# Altium footprint library ICs_VendorSpecific.PcbLib: 247 footprints (part 7 of 19)
Each footprint in its own frame and in the unit in brackets; x right, y up, seen from the top. Pads: shape width x height; smd on the part's side, far side on the other; paste and mask are expansions set on the pad; w line width, h text height; cw(c..) or ccw(c..) is an arc to the next point about the centre after c.
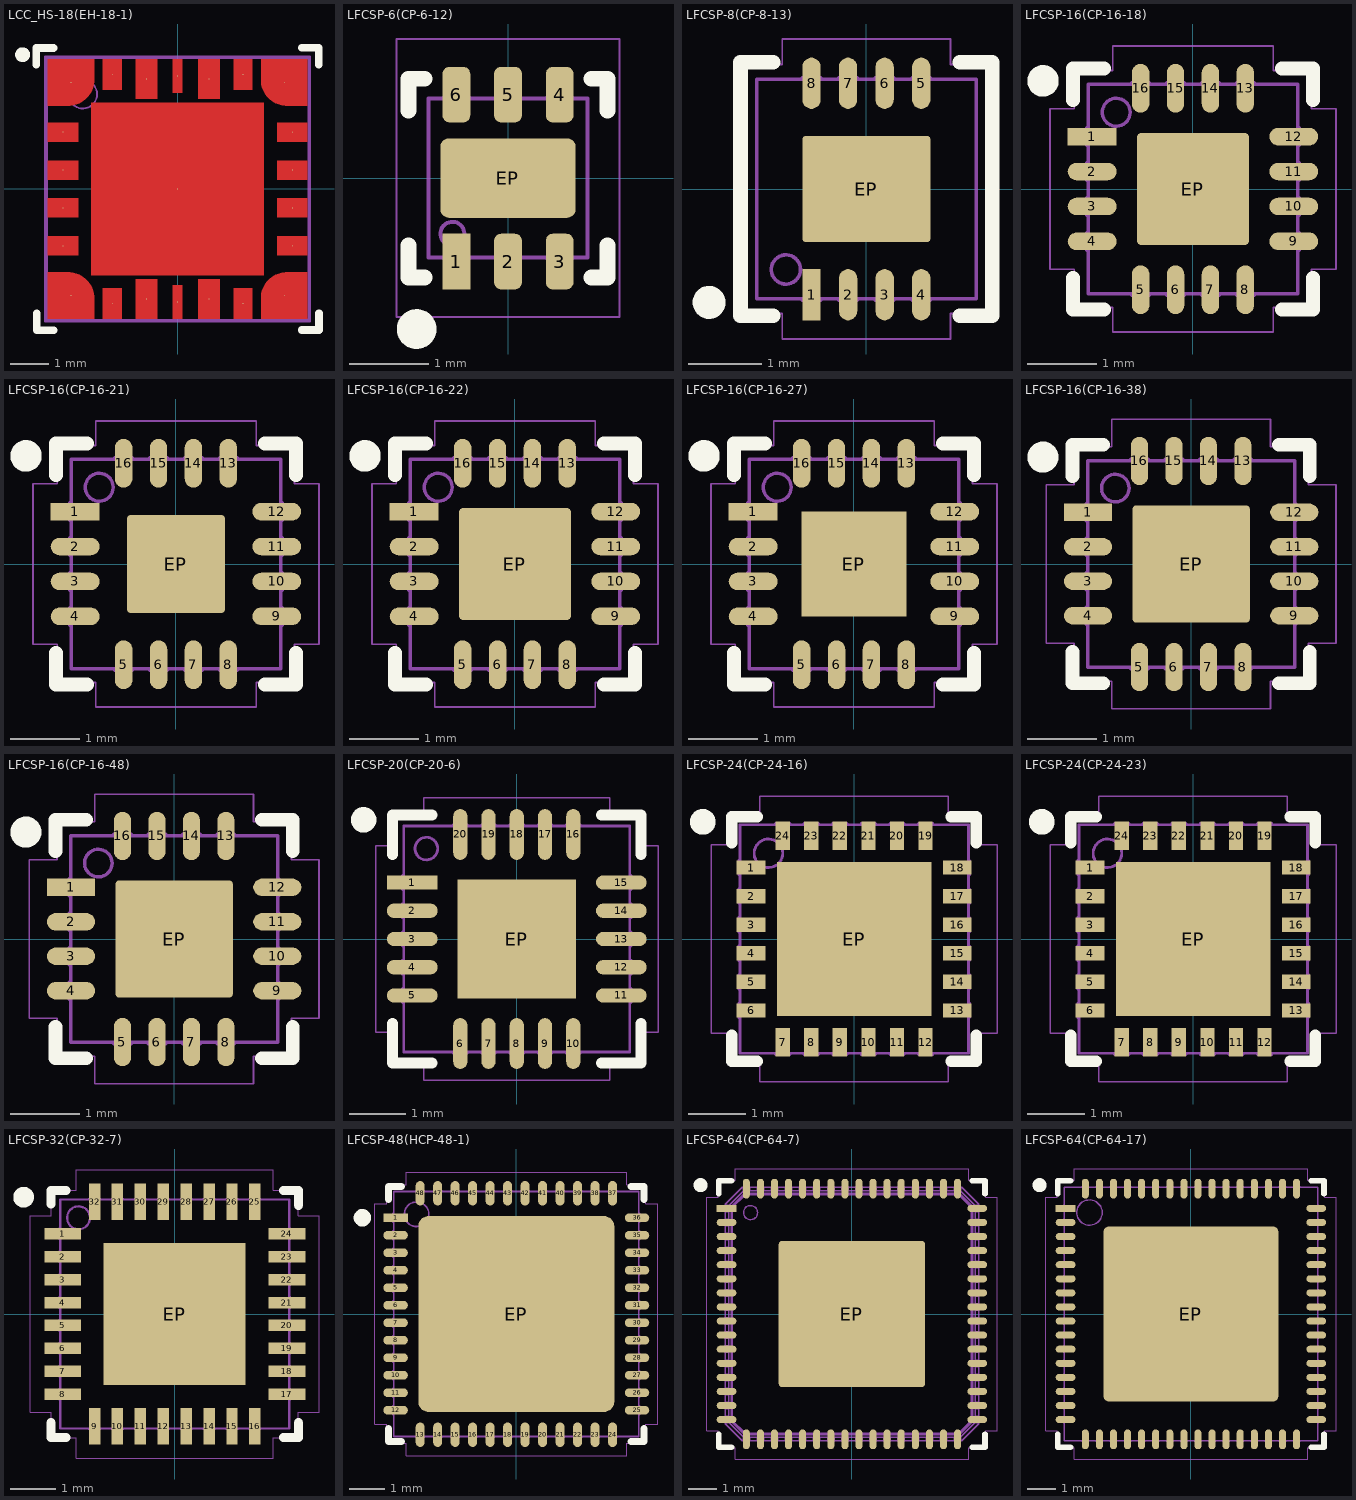
[diagram p6: the footprints below, top view; thin cyan lines are the x and y axes]

## LCC_HS-18(EH-18-1) [mil] "18-Terminal Ceramic Leadless Chip Carrier with Heat Sink  [LCC_HS], Thermal Pad 4.55x4.55mm"
height 51.85
pads (23):
  round 1 smd: 1(-119.09,59.06) 2(-119.09,19.69) 3(-119.09,-19.68) 4(-119.09,-59.06) 5(-67.91,-119.09) 6(-32.48,-114.17) 7(0,-117.32) 8(32.48,-114.17) 9(67.91,-119.09) 10(119.09,-59.06) 11(119.09,-19.68) 12(119.09,19.69) 13(119.09,59.06) 14(67.91,119.09) 15(32.48,114.17) 16(0,117.32) 17(-32.48,114.17) 18(-67.91,119.09) EP(-110.73,-110.73) EP(-110.73,110.73) EP(110.73,-110.73) EP(110.73,110.73)
  round 1 smd paste-196.85: EP(0,0)
Top Layer:
  region: -134.84,-86.61 -113.5,-86.61 -111.74,-86.61 -108.24,-87.07 -104.84,-87.99 -101.58,-89.33 -98.53,-91.1 -95.73,-93.24 -93.24,-95.73 -91.1,-98.53 -89.34,-101.58 -87.99,-104.84 -87.07,-108.24 -86.61,-111.73 -86.61,-113.5 -86.61,-134.84 -134.84,-134.84
  region: 134.84,86.61 113.5,86.61 111.74,86.61 108.24,87.07 104.84,87.99 101.58,89.33 98.53,91.1 95.73,93.24 93.24,95.73 91.1,98.53 89.34,101.58 87.99,104.84 87.07,108.24 86.61,111.74 86.61,113.5 86.61,134.84 134.84,134.84
  region: 86.61,-134.84 86.61,-113.5 86.61,-111.74 87.07,-108.24 87.99,-104.84 89.33,-101.58 91.1,-98.53 93.24,-95.73 95.73,-93.24 98.53,-91.1 101.58,-89.34 104.84,-87.99 108.24,-87.07 111.74,-86.61 113.5,-86.61 134.84,-86.61 134.84,-134.84
  region: -58.07,-134.84 -77.76,-134.84 -77.76,-103.35 -58.07,-103.35
  region: -21.26,-134.84 -43.7,-134.84 -43.7,-93.5 -21.26,-93.5
  region: 58.07,-134.84 77.76,-134.84 77.76,-103.35 58.07,-103.35
  region: 21.26,-134.84 43.7,-134.84 43.7,-93.5 21.26,-93.5
  region: -4.92,-134.84 4.92,-134.84 4.92,-99.8 -4.92,-99.8
  region: 58.07,134.84 77.76,134.84 77.76,103.35 58.07,103.35
  region: 21.26,134.84 43.7,134.84 43.7,93.5 21.26,93.5
  region: -58.07,134.84 -77.76,134.84 -77.76,103.35 -58.07,103.35
  region: -21.26,134.84 -43.7,134.84 -43.7,93.5 -21.26,93.5
  region: 134.84,-68.9 134.84,-49.21 103.35,-49.21 103.35,-68.9
  region: 134.84,-29.53 134.84,-9.84 103.35,-9.84 103.35,-29.53
  region: 134.84,9.84 134.84,29.53 103.35,29.53 103.35,9.84
  region: 134.84,49.21 134.84,68.9 103.35,68.9 103.35,49.21
  region: -134.84,-68.9 -134.84,-49.21 -103.35,-49.21 -103.35,-68.9
  region: -134.84,-29.53 -134.84,-9.84 -103.35,-9.84 -103.35,-29.53
  region: -134.84,9.84 -134.84,29.53 -103.35,29.53 -103.35,9.84
  region: -134.84,49.21 -134.84,68.9 -103.35,68.9 -103.35,49.21
  region: 4.92,134.84 -4.92,134.84 -4.92,99.8 4.92,99.8
  region: -86.61,134.84 -86.61,113.5 -86.61,111.74 -87.07,108.24 -87.99,104.84 -89.33,101.58 -91.1,98.53 -93.24,95.73 -95.73,93.24 -98.53,91.1 -101.58,89.34 -104.84,87.99 -108.24,87.07 -111.73,86.61 -113.5,86.61 -134.84,86.61 -134.84,134.84
  region: -89.57,-89.57 89.57,-89.57 89.57,89.57 -89.57,89.57
Top Overlay:
  circle w7.87: c-161.05,139.5 r3.74
  lines w7.87: -146.85,128.93 -146.85,146.46 -128.93,146.46 ; -146.46,-128.93 -146.46,-146.85 -128.93,-146.85 ; 128.93,-146.46 146.85,-146.46 146.85,-128.93 ; 128.93,146.85 146.46,146.85 146.46,128.93
Top Paste:
  rectangle: 4.92,50.2 40.35,85.63
  rectangle: -40.35,50.2 -4.92,85.63
  rectangle: -85.63,50.2 -50.2,85.63
  region: 85.63,85.63 50.2,85.63 50.2,50.2 85.63,50.2
  region: -85.63,-4.92 -85.63,-40.35 -50.2,-40.35 -50.2,-4.92
  region: -85.63,40.35 -85.63,4.92 -50.2,4.92 -50.2,40.35
  region: -50.2,-85.63 -50.2,-50.2 -85.63,-50.2 -85.63,-85.63
  region: -40.35,-4.92 -40.35,-40.35 -4.92,-40.35 -4.92,-4.92
  region: -40.35,40.35 -40.35,4.92 -4.92,4.92 -4.92,40.35
  region: -4.92,-85.63 -4.92,-50.2 -40.35,-50.2 -40.35,-85.63
  region: 4.92,-4.92 4.92,-40.35 40.35,-40.35 40.35,-4.92
  region: 4.92,40.35 4.92,4.92 40.35,4.92 40.35,40.35
  region: 40.35,-85.63 40.35,-50.2 4.92,-50.2 4.92,-85.63
  region: 50.2,-4.92 50.2,-40.35 85.63,-40.35 85.63,-4.92
  region: 50.2,40.35 50.2,4.92 85.63,4.92 85.63,40.35
  region: 85.63,-85.63 85.63,-50.2 50.2,-50.2 50.2,-85.63
Top Assembly:
  circle w1.97: c-98.43,98.43 r14.76
  lines w1.97: -135.83,-133.86 ccw(c-133.86,-133.86) -133.86,-135.83 ; -135.83,133.86 cw(c-133.86,133.86) -133.86,135.83 ; 133.86,-135.83 ccw(c133.86,-133.86) 135.83,-133.86 ; 133.86,135.83 cw(c133.86,133.86) 135.83,133.86 ; -137.8,-137.8 -137.8,137.8 ; -137.8,-137.8 -135.83,-135.83 ; -137.8,-137.8 137.8,-137.8 ; -137.8,137.8 -135.83,135.83 ; -137.8,137.8 137.8,137.8 ; -135.83,-135.83 -135.83,135.83 ; -135.83,-135.83 135.83,-135.83 ; -135.83,135.83 135.83,135.83 ; 135.83,-135.83 135.83,135.83 ; 135.83,-135.83 137.8,-137.8 ; 135.83,135.83 137.8,137.8 ; 137.8,-137.8 137.8,137.8
  text ".Designator" at -133.01,-13.35 h59.06
3D body "LCC_HS(EH-18-1).x_t": height 52.64, standoff 0, extent -137.8,-137.8 137.8,137.8

## LFCSP-6(CP-6-12) [mm] "QFN, 6-Leads, Body 2x2mm, Pitch 0.650mm, Thermal Pad 1.0x1.6mm"
height 0.85
pads (7):
  rect 0.35x0.7 smd mask+0.05: 1(-0.65,-1.05)
  rrect50% 0.35x0.7 smd mask+0.05: 2(0,-1.05) 3(0.65,-1.05) 4(0.65,1.05) 5(0,1.05) 6(-0.65,1.05)
  rrect20% 1.7x1 smd mask+0.05: EP(0,0)
Top Overlay:
  circle w0.25: c-1.15,-1.9 r0.125
  lines w0.2: -1.25,-0.85 -1.25,-1.25 -1.05,-1.25 ; -1.25,0.85 -1.25,1.25 -1.05,1.25 ; 1.05,-1.25 1.25,-1.25 1.25,-0.85 ; 1.05,1.25 1.25,1.25 1.25,0.85
Top Courtyard:
  lines w0.025: -1.4,-1.75 -1.4,1.75 1.4,1.75 1.4,-1.75 -1.4,-1.75
Top Assembly:
  circle w0.05: c-0.7,-0.7 r0.15
  lines w0.05: -0.8,-1 -0.8,-1.02 -0.5,-1.02 -0.5,-1 ; -0.8,1 -0.8,1.02 -0.5,1.02 -0.5,1 ; -0.15,-1 -0.15,-1.02 0.15,-1.02 0.15,-1 ; -0.15,1 -0.15,1.02 0.15,1.02 0.15,1 ; 0.5,-1 0.5,-1.02 0.8,-1.02 0.8,-1 ; 0.5,1 0.5,1.02 0.8,1.02 0.8,1 ; -1,-1 -1,1 1,1 1,-1 -1,-1
  text ".Designator" at -2.252,-0.226 h1
3D body "LFCSP6(CP-6-12).x_t": height 0.87, standoff 0, extent -1,-1.02 1,1.02

## LFCSP-8(CP-8-13) [mm] "QFN, 8-Leads, Body 3x3mm, Pitch 0.50mm, Thermal Pad 1.45x1.74mm. Compliant to JEDEC standards MO-229-WEED-4"
height 0.75
pads (9):
  rect 0.25x0.7 smd mask+0.05: 1(-0.75,-1.445)
  oval 0.25x0.7 smd mask+0.05: 2(-0.25,-1.445) 3(0.25,-1.445) 4(0.75,-1.445) 5(0.75,1.445) 6(0.25,1.445) 7(-0.25,1.445) 8(-0.75,1.445)
  rrect6% 1.75x1.45 smd paste-5 mask+0.05: EP(0,0)
Top Overlay:
  circle w0.25: c-2.15,-1.55 r0.1
  lines w0.2: -1.275,-1.73 -1.72,-1.73 -1.72,1.73 -1.275,1.73 ; 1.275,-1.73 1.72,-1.73 1.72,1.73 1.275,1.73
Top Paste:
  rectangle: -0.85,0.1 -0.1,0.7
  rectangle: -0.85,-0.7 -0.1,-0.1
  region: 0.85,-0.1 0.1,-0.1 0.1,-0.7 0.85,-0.7
  region: 0.85,0.7 0.1,0.7 0.1,0.1 0.85,0.1
Top Courtyard:
  lines w0.025: -1.7,-1.7 -1.7,-1.15 -1.7,1.15 -1.7,1.7 -1.15,1.7 -1.15,2.05 1.15,2.05 1.15,1.7 1.7,1.7 1.7,1.15 1.7,-1.15 1.7,-1.7 1.15,-1.7 1.15,-2.05 -1.15,-2.05 -1.15,-1.7 -1.7,-1.7
Top Assembly:
  circle w0.05: c-1.1,-1.1 r0.2
  lines w0.05: -0.875,-1.5 -0.875,-1.52 -0.625,-1.52 -0.625,-1.5 ; -0.875,1.5 -0.875,1.52 -0.625,1.52 -0.625,1.5 ; -0.375,-1.5 -0.375,-1.52 -0.125,-1.52 -0.125,-1.5 ; -0.375,1.5 -0.375,1.52 -0.125,1.52 -0.125,1.5 ; 0.125,-1.5 0.125,-1.52 0.375,-1.52 0.375,-1.5 ; 0.125,1.5 0.125,1.52 0.375,1.52 0.375,1.5 ; 0.625,-1.5 0.625,-1.52 0.875,-1.52 0.875,-1.5 ; 0.625,1.5 0.625,1.52 0.875,1.52 0.875,1.5 ; -1.5,-1.5 -1.5,1.5 1.5,1.5 1.5,-1.5 -1.5,-1.5
  text ".Designator" at -4.511,-0.453 h2
3D body "LFCSP8(CP-8-13).x_t": height 0.8, standoff 0, extent -1.5,-1.525 1.5,1.525

## LFCSP-16(CP-16-18) [mm] "QFN, 16-Leads, Body 3x3mm, Pitch 0.50mm, Thermal Pad 1.50x1.50mm. Compliant to JEDEC standards MO-220-WEED-6"
height 0.75
pads (17):
  rect 0.7x0.25 smd mask+0.05: 1(-1.445,0.75)
  oval 0.7x0.25 smd mask+0.05: 2(-1.445,0.25) 3(-1.445,-0.25) 4(-1.445,-0.75) 9(1.445,-0.75) 10(1.445,-0.25) 11(1.445,0.25) 12(1.445,0.75)
  oval 0.25x0.7 smd mask+0.05: 5(-0.75,-1.445) 6(-0.25,-1.445) 7(0.25,-1.445) 8(0.75,-1.445) 13(0.75,1.445) 14(0.25,1.445) 15(-0.25,1.445) 16(-0.75,1.445)
  rrect6% 1.6x1.6 smd paste-5 mask+0.05: EP(0,0)
Top Overlay:
  circle w0.25: c-2.15,1.55 r0.1
  lines w0.2: -1.72,-1.275 -1.72,-1.73 -1.275,-1.73 ; -1.72,1.275 -1.72,1.73 -1.275,1.73 ; 1.275,-1.73 1.72,-1.73 1.72,-1.275 ; 1.275,1.73 1.72,1.73 1.72,1.275
Top Paste:
  rectangle: -0.7,0.1 -0.1,0.7
  rectangle: -0.7,-0.7 -0.1,-0.1
  region: 0.7,-0.1 0.1,-0.1 0.1,-0.7 0.7,-0.7
  region: 0.7,0.7 0.1,0.7 0.1,0.1 0.7,0.1
Top Courtyard:
  lines w0.025: -2.05,-1.15 -1.7,-1.15 -1.7,-1.7 -1.15,-1.7 -1.15,-2.05 1.15,-2.05 1.15,-1.7 1.7,-1.7 1.7,-1.15 2.05,-1.15 2.05,1.15 1.7,1.15 1.7,1.7 1.15,1.7 1.15,2.05 -1.15,2.05 -1.15,1.7 -1.7,1.7 -1.7,1.15 -2.05,1.15 -2.05,-1.15
Top Assembly:
  circle w0.05: c-1.1,1.1 r0.2
  lines w0.05: -1.5,-0.875 -1.52,-0.875 -1.52,-0.625 -1.5,-0.625 ; -1.5,-0.375 -1.52,-0.375 -1.52,-0.125 -1.5,-0.125 ; -1.5,0.125 -1.52,0.125 -1.52,0.375 -1.5,0.375 ; -1.5,0.625 -1.52,0.625 -1.52,0.875 -1.5,0.875 ; -0.875,-1.5 -0.875,-1.52 -0.625,-1.52 -0.625,-1.5 ; -0.875,1.5 -0.875,1.52 -0.625,1.52 -0.625,1.5 ; -0.375,-1.5 -0.375,-1.52 -0.125,-1.52 -0.125,-1.5 ; -0.375,1.5 -0.375,1.52 -0.125,1.52 -0.125,1.5 ; 0.125,-1.5 0.125,-1.52 0.375,-1.52 0.375,-1.5 ; 0.125,1.5 0.125,1.52 0.375,1.52 0.375,1.5 ; 0.625,-1.5 0.625,-1.52 0.875,-1.52 0.875,-1.5 ; 0.625,1.5 0.625,1.52 0.875,1.52 0.875,1.5 ; 1.5,-0.875 1.52,-0.875 1.52,-0.625 1.5,-0.625 ; 1.5,-0.375 1.52,-0.375 1.52,-0.125 1.5,-0.125 ; 1.5,0.125 1.52,0.125 1.52,0.375 1.5,0.375 ; 1.5,0.625 1.52,0.625 1.52,0.875 1.5,0.875 ; -1.5,-1.5 -1.5,1.5 1.5,1.5 1.5,-1.5 -1.5,-1.5
  text ".Designator" at -4.511,-0.453 h2
3D body "LFCSP16(CP-16-18).x_t": height 0.8, standoff 0, extent -1.525,-1.525 1.525,1.525

## LFCSP-16(CP-16-21) [mm] "QFN, 16-Leads, Body 3x3mm, Pitch 0.50mm, Thermal Pad 1.30x1.30mm. Compliant to JEDEC standards MO-220-WEED-6"
height 0.75
pads (17):
  rect 0.7x0.25 smd mask+0.05: 1(-1.445,0.75)
  oval 0.7x0.25 smd mask+0.05: 2(-1.445,0.25) 3(-1.445,-0.25) 4(-1.445,-0.75) 9(1.445,-0.75) 10(1.445,-0.25) 11(1.445,0.25) 12(1.445,0.75)
  oval 0.25x0.7 smd mask+0.05: 5(-0.75,-1.445) 6(-0.25,-1.445) 7(0.25,-1.445) 8(0.75,-1.445) 13(0.75,1.445) 14(0.25,1.445) 15(-0.25,1.445) 16(-0.75,1.445)
  rrect6% 1.4x1.4 smd paste-5 mask+0.05: EP(0,0)
Top Overlay:
  circle w0.25: c-2.15,1.55 r0.1
  lines w0.2: -1.72,-1.275 -1.72,-1.73 -1.275,-1.73 ; -1.72,1.275 -1.72,1.73 -1.275,1.73 ; 1.275,-1.73 1.72,-1.73 1.72,-1.275 ; 1.275,1.73 1.72,1.73 1.72,1.275
Top Paste:
  region: 0.7,0.7 0.1,0.7 0.1,0.1 0.7,0.1
  region: 0.7,-0.1 0.1,-0.1 0.1,-0.7 0.7,-0.7
  rectangle: -0.7,-0.7 -0.1,-0.1
  rectangle: -0.7,0.1 -0.1,0.7
Top Courtyard:
  lines w0.025: -2.05,-1.15 -2.05,1.15 -1.7,1.15 -1.7,1.7 -1.15,1.7 -1.15,2.05 1.15,2.05 1.15,1.7 1.7,1.7 1.7,1.15 2.05,1.15 2.05,-1.15 1.7,-1.15 1.7,-1.7 1.15,-1.7 1.15,-2.05 -1.15,-2.05 -1.15,-1.7 -1.7,-1.7 -1.7,-1.15 -2.05,-1.15
Top Assembly:
  circle w0.05: c-1.1,1.1 r0.2
  lines w0.05: -1.5,-0.875 -1.52,-0.875 -1.52,-0.625 -1.5,-0.625 ; -1.5,-0.375 -1.52,-0.375 -1.52,-0.125 -1.5,-0.125 ; -1.5,0.125 -1.52,0.125 -1.52,0.375 -1.5,0.375 ; -1.5,0.625 -1.52,0.625 -1.52,0.875 -1.5,0.875 ; -0.875,-1.5 -0.875,-1.52 -0.625,-1.52 -0.625,-1.5 ; -0.875,1.5 -0.875,1.52 -0.625,1.52 -0.625,1.5 ; -0.375,-1.5 -0.375,-1.52 -0.125,-1.52 -0.125,-1.5 ; -0.375,1.5 -0.375,1.52 -0.125,1.52 -0.125,1.5 ; 0.125,-1.5 0.125,-1.52 0.375,-1.52 0.375,-1.5 ; 0.125,1.5 0.125,1.52 0.375,1.52 0.375,1.5 ; 0.625,-1.5 0.625,-1.52 0.875,-1.52 0.875,-1.5 ; 0.625,1.5 0.625,1.52 0.875,1.52 0.875,1.5 ; 1.5,-0.875 1.52,-0.875 1.52,-0.625 1.5,-0.625 ; 1.5,-0.375 1.52,-0.375 1.52,-0.125 1.5,-0.125 ; 1.5,0.125 1.52,0.125 1.52,0.375 1.5,0.375 ; 1.5,0.625 1.52,0.625 1.52,0.875 1.5,0.875 ; -1.5,-1.5 1.5,-1.5 1.5,1.5 -1.5,1.5 -1.5,-1.5
  text ".Designator" at -4.511,-0.453 h2
3D body "LFCSP16(CP-16-21)_X_T.x_t": height 0.8, standoff 0, extent -1.525,-1.525 1.525,1.525

## LFCSP-16(CP-16-22) [mm] "QFN, 16-Leads, Body 3x3mm, Pitch 0.50mm, Thermal Pad 1.50x1.50mm. Compliant to JEDEC standards MO-220-WEED-6"
height 0.75
pads (17):
  rect 0.7x0.25 smd mask+0.05: 1(-1.445,0.75)
  oval 0.7x0.25 smd mask+0.05: 2(-1.445,0.25) 3(-1.445,-0.25) 4(-1.445,-0.75) 9(1.445,-0.75) 10(1.445,-0.25) 11(1.445,0.25) 12(1.445,0.75)
  oval 0.25x0.7 smd mask+0.05: 5(-0.75,-1.445) 6(-0.25,-1.445) 7(0.25,-1.445) 8(0.75,-1.445) 13(0.75,1.445) 14(0.25,1.445) 15(-0.25,1.445) 16(-0.75,1.445)
  rrect6% 1.6x1.6 smd paste-5 mask+0.05: EP(0,0)
Top Overlay:
  circle w0.25: c-2.15,1.55 r0.1
  lines w0.2: -1.72,-1.275 -1.72,-1.73 -1.275,-1.73 ; -1.72,1.275 -1.72,1.73 -1.275,1.73 ; 1.275,-1.73 1.72,-1.73 1.72,-1.275 ; 1.275,1.73 1.72,1.73 1.72,1.275
Top Paste:
  region: 0.7,0.7 0.1,0.7 0.1,0.1 0.7,0.1
  region: 0.7,-0.1 0.1,-0.1 0.1,-0.7 0.7,-0.7
  rectangle: -0.7,-0.7 -0.1,-0.1
  rectangle: -0.7,0.1 -0.1,0.7
Top Courtyard:
  lines w0.025: -2.05,-1.15 -2.05,1.15 -1.7,1.15 -1.7,1.7 -1.15,1.7 -1.15,2.05 1.15,2.05 1.15,1.7 1.7,1.7 1.7,1.15 2.05,1.15 2.05,-1.15 1.7,-1.15 1.7,-1.7 1.15,-1.7 1.15,-2.05 -1.15,-2.05 -1.15,-1.7 -1.7,-1.7 -1.7,-1.15 -2.05,-1.15
Top Assembly:
  circle w0.05: c-1.1,1.1 r0.2
  lines w0.05: -1.5,-0.875 -1.52,-0.875 -1.52,-0.625 -1.5,-0.625 ; -1.5,-0.375 -1.52,-0.375 -1.52,-0.125 -1.5,-0.125 ; -1.5,0.125 -1.52,0.125 -1.52,0.375 -1.5,0.375 ; -1.5,0.625 -1.52,0.625 -1.52,0.875 -1.5,0.875 ; -0.875,-1.5 -0.875,-1.52 -0.625,-1.52 -0.625,-1.5 ; -0.875,1.5 -0.875,1.52 -0.625,1.52 -0.625,1.5 ; -0.375,-1.5 -0.375,-1.52 -0.125,-1.52 -0.125,-1.5 ; -0.375,1.5 -0.375,1.52 -0.125,1.52 -0.125,1.5 ; 0.125,-1.5 0.125,-1.52 0.375,-1.52 0.375,-1.5 ; 0.125,1.5 0.125,1.52 0.375,1.52 0.375,1.5 ; 0.625,-1.5 0.625,-1.52 0.875,-1.52 0.875,-1.5 ; 0.625,1.5 0.625,1.52 0.875,1.52 0.875,1.5 ; 1.5,-0.875 1.52,-0.875 1.52,-0.625 1.5,-0.625 ; 1.5,-0.375 1.52,-0.375 1.52,-0.125 1.5,-0.125 ; 1.5,0.125 1.52,0.125 1.52,0.375 1.5,0.375 ; 1.5,0.625 1.52,0.625 1.52,0.875 1.5,0.875 ; -1.5,-1.5 1.5,-1.5 1.5,1.5 -1.5,1.5 -1.5,-1.5
  text ".Designator" at -4.511,-0.453 h2
3D body "LFCSP16(CP-16-22).x_t": height 0.8, standoff 0, extent -1.525,-1.525 1.525,1.525

## LFCSP-16(CP-16-27) [mm] "QFN, 16-Leads, Body 3x3mm, Pitch 0.50mm, Thermal Pad 1.50x1.50mm. Compliant to JEDEC standards MO-220-WEED-6"
height 0.85
pads (17):
  rect 0.7x0.25 smd mask+0.05: 1(-1.445,0.75)
  oval 0.7x0.25 smd mask+0.05: 2(-1.445,0.25) 3(-1.445,-0.25) 4(-1.445,-0.75) 9(1.445,-0.75) 10(1.445,-0.25) 11(1.445,0.25) 12(1.445,0.75)
  oval 0.25x0.7 smd mask+0.05: 5(-0.75,-1.445) 6(-0.25,-1.445) 7(0.25,-1.445) 8(0.75,-1.445) 13(0.75,1.445) 14(0.25,1.445) 15(-0.25,1.445) 16(-0.75,1.445)
  rect 1.5x1.5 smd paste-5 mask+0.07: EP(0,0)
Top Overlay:
  circle w0.25: c-2.15,1.55 r0.1
  lines w0.2: -1.72,-1.275 -1.72,-1.73 -1.275,-1.73 ; -1.72,1.275 -1.72,1.73 -1.275,1.73 ; 1.275,-1.73 1.72,-1.73 1.72,-1.275 ; 1.275,1.73 1.72,1.73 1.72,1.275
Top Paste:
  region: 0.7,0.7 0.1,0.7 0.1,0.1 0.7,0.1
  region: 0.7,-0.1 0.1,-0.1 0.1,-0.7 0.7,-0.7
  rectangle: -0.7,-0.7 -0.1,-0.1
  rectangle: -0.7,0.1 -0.1,0.7
Top Courtyard:
  lines w0.025: -2.05,-1.15 -2.05,1.15 -1.7,1.15 -1.7,1.7 -1.15,1.7 -1.15,2.05 1.15,2.05 1.15,1.7 1.7,1.7 1.7,1.15 2.05,1.15 2.05,-1.15 1.7,-1.15 1.7,-1.7 1.15,-1.7 1.15,-2.05 -1.15,-2.05 -1.15,-1.7 -1.7,-1.7 -1.7,-1.15 -2.05,-1.15
Top Assembly:
  circle w0.05: c-1.1,1.1 r0.2
  lines w0.05: -1.5,-0.875 -1.52,-0.875 -1.52,-0.625 -1.5,-0.625 ; -1.5,-0.375 -1.52,-0.375 -1.52,-0.125 -1.5,-0.125 ; -1.5,0.125 -1.52,0.125 -1.52,0.375 -1.5,0.375 ; -1.5,0.625 -1.52,0.625 -1.52,0.875 -1.5,0.875 ; -0.875,-1.5 -0.875,-1.52 -0.625,-1.52 -0.625,-1.5 ; -0.875,1.5 -0.875,1.52 -0.625,1.52 -0.625,1.5 ; -0.375,-1.5 -0.375,-1.52 -0.125,-1.52 -0.125,-1.5 ; -0.375,1.5 -0.375,1.52 -0.125,1.52 -0.125,1.5 ; 0.125,-1.5 0.125,-1.52 0.375,-1.52 0.375,-1.5 ; 0.125,1.5 0.125,1.52 0.375,1.52 0.375,1.5 ; 0.625,-1.5 0.625,-1.52 0.875,-1.52 0.875,-1.5 ; 0.625,1.5 0.625,1.52 0.875,1.52 0.875,1.5 ; 1.5,-0.875 1.52,-0.875 1.52,-0.625 1.5,-0.625 ; 1.5,-0.375 1.52,-0.375 1.52,-0.125 1.5,-0.125 ; 1.5,0.125 1.52,0.125 1.52,0.375 1.5,0.375 ; 1.5,0.625 1.52,0.625 1.52,0.875 1.5,0.875 ; -1.5,-1.5 1.5,-1.5 1.5,1.5 -1.5,1.5 -1.5,-1.5
  text ".Designator" at -4.511,-0.453 h2
3D body "CP-16-27(LFCSP16).x_t": height 0.78, standoff 0, extent -1.52,-1.52 1.52,1.52

## LFCSP-16(CP-16-38) [mm] "QFN, 16-Leads, Body 3x3mm, Pitch 0.50mm, Thermal Pad 1.70x1.70mm. Compliant to JEDEC standards MO-220-VEED-4"
height 0.85
pads (17):
  rect 0.7x0.25 smd mask+0.05: 1(-1.495,0.75)
  oval 0.7x0.25 smd mask+0.05: 2(-1.495,0.25) 3(-1.495,-0.25) 4(-1.495,-0.75) 9(1.495,-0.75) 10(1.495,-0.25) 11(1.495,0.25) 12(1.495,0.75)
  oval 0.25x0.7 smd mask+0.05: 5(-0.75,-1.495) 6(-0.25,-1.495) 7(0.25,-1.495) 8(0.75,-1.495) 13(0.75,1.495) 14(0.25,1.495) 15(-0.25,1.495) 16(-0.75,1.495)
  rrect6% 1.7x1.7 smd paste-5 mask+0.05: EP(0,0)
Top Overlay:
  circle w0.25: c-2.15,1.55 r0.1
  lines w0.2: -1.72,-1.275 -1.72,-1.73 -1.275,-1.73 ; -1.72,1.275 -1.72,1.73 -1.275,1.73 ; 1.275,-1.73 1.72,-1.73 1.72,-1.275 ; 1.275,1.73 1.72,1.73 1.72,1.275
Top Paste:
  region: 0.7,0.7 0.1,0.7 0.1,0.1 0.7,0.1
  region: 0.7,-0.1 0.1,-0.1 0.1,-0.7 0.7,-0.7
  rectangle: -0.7,-0.7 -0.1,-0.1
  rectangle: -0.7,0.1 -0.1,0.7
Top Courtyard:
  lines w0.025: -2.1,-1.15 -2.1,1.15 -1.7,1.15 -1.7,1.7 -1.15,1.7 -1.15,2.1 1.15,2.1 1.15,1.7 1.7,1.7 1.7,1.15 2.1,1.15 2.1,-1.15 1.7,-1.15 1.7,-1.7 1.15,-1.7 1.15,-2.1 -1.15,-2.1 -1.15,-1.7 -1.7,-1.7 -1.7,-1.15 -2.1,-1.15
Top Assembly:
  circle w0.05: c-1.1,1.1 r0.2
  lines w0.05: -1.5,-0.875 -1.52,-0.875 -1.52,-0.625 -1.5,-0.625 ; -1.5,-0.375 -1.52,-0.375 -1.52,-0.125 -1.5,-0.125 ; -1.5,0.125 -1.52,0.125 -1.52,0.375 -1.5,0.375 ; -1.5,0.625 -1.52,0.625 -1.52,0.875 -1.5,0.875 ; -0.875,-1.5 -0.875,-1.52 -0.625,-1.52 -0.625,-1.5 ; -0.875,1.5 -0.875,1.52 -0.625,1.52 -0.625,1.5 ; -0.375,-1.5 -0.375,-1.52 -0.125,-1.52 -0.125,-1.5 ; -0.375,1.5 -0.375,1.52 -0.125,1.52 -0.125,1.5 ; 0.125,-1.5 0.125,-1.52 0.375,-1.52 0.375,-1.5 ; 0.125,1.5 0.125,1.52 0.375,1.52 0.375,1.5 ; 0.625,-1.5 0.625,-1.52 0.875,-1.52 0.875,-1.5 ; 0.625,1.5 0.625,1.52 0.875,1.52 0.875,1.5 ; 1.5,-0.875 1.52,-0.875 1.52,-0.625 1.5,-0.625 ; 1.5,-0.375 1.52,-0.375 1.52,-0.125 1.5,-0.125 ; 1.5,0.125 1.52,0.125 1.52,0.375 1.5,0.375 ; 1.5,0.625 1.52,0.625 1.52,0.875 1.5,0.875 ; -1.5,-1.5 1.5,-1.5 1.5,1.5 -1.5,1.5 -1.5,-1.5
  text ".Designator" at -4.511,-0.453 h2
3D body "CP-16-38(LFCSP16).x_t": height 0.88, standoff 0, extent -1.52,-1.52 1.52,1.52

## LFCSP-16(CP-16-48) [mm] "QFN, 16-Leads, Body 3x3mm, Pitch 0.50mm, Thermal Pad 1.70x1.70mm. Compliant to JEDEC standards MO-220-WEED-4"
height 0.75
pads (17):
  rect 0.7x0.25 smd mask+0.05: 1(-1.495,0.75)
  oval 0.7x0.25 smd mask+0.05: 2(-1.495,0.25) 3(-1.495,-0.25) 4(-1.495,-0.75) 9(1.495,-0.75) 10(1.495,-0.25) 11(1.495,0.25) 12(1.495,0.75)
  oval 0.25x0.7 smd mask+0.05: 5(-0.75,-1.495) 6(-0.25,-1.495) 7(0.25,-1.495) 8(0.75,-1.495) 13(0.75,1.495) 14(0.25,1.495) 15(-0.25,1.495) 16(-0.75,1.495)
  rrect6% 1.7x1.7 smd paste-5 mask+0.05: EP(0,0)
Top Overlay:
  circle w0.25: c-2.15,1.55 r0.1
  lines w0.2: -1.72,-1.275 -1.72,-1.73 -1.275,-1.73 ; -1.72,1.275 -1.72,1.73 -1.275,1.73 ; 1.275,-1.73 1.72,-1.73 1.72,-1.275 ; 1.275,1.73 1.72,1.73 1.72,1.275
Top Paste:
  rectangle: -0.7,0.1 -0.1,0.7
  rectangle: -0.7,-0.7 -0.1,-0.1
  region: 0.7,-0.1 0.1,-0.1 0.1,-0.7 0.7,-0.7
  region: 0.7,0.7 0.1,0.7 0.1,0.1 0.7,0.1
Top Courtyard:
  lines w0.025: -2.1,-1.15 -1.7,-1.15 -1.7,-1.7 -1.15,-1.7 -1.15,-2.1 1.15,-2.1 1.15,-1.7 1.7,-1.7 1.7,-1.15 2.1,-1.15 2.1,1.15 1.7,1.15 1.7,1.7 1.15,1.7 1.15,2.1 -1.15,2.1 -1.15,1.7 -1.7,1.7 -1.7,1.15 -2.1,1.15 -2.1,-1.15
Top Assembly:
  circle w0.05: c-1.1,1.1 r0.2
  lines w0.05: -1.5,-0.875 -1.52,-0.875 -1.52,-0.625 -1.5,-0.625 ; -1.5,-0.375 -1.52,-0.375 -1.52,-0.125 -1.5,-0.125 ; -1.5,0.125 -1.52,0.125 -1.52,0.375 -1.5,0.375 ; -1.5,0.625 -1.52,0.625 -1.52,0.875 -1.5,0.875 ; -0.875,-1.5 -0.875,-1.52 -0.625,-1.52 -0.625,-1.5 ; -0.875,1.5 -0.875,1.52 -0.625,1.52 -0.625,1.5 ; -0.375,-1.5 -0.375,-1.52 -0.125,-1.52 -0.125,-1.5 ; -0.375,1.5 -0.375,1.52 -0.125,1.52 -0.125,1.5 ; 0.125,-1.5 0.125,-1.52 0.375,-1.52 0.375,-1.5 ; 0.125,1.5 0.125,1.52 0.375,1.52 0.375,1.5 ; 0.625,-1.5 0.625,-1.52 0.875,-1.52 0.875,-1.5 ; 0.625,1.5 0.625,1.52 0.875,1.52 0.875,1.5 ; 1.5,-0.875 1.52,-0.875 1.52,-0.625 1.5,-0.625 ; 1.5,-0.375 1.52,-0.375 1.52,-0.125 1.5,-0.125 ; 1.5,0.125 1.52,0.125 1.52,0.375 1.5,0.375 ; 1.5,0.625 1.52,0.625 1.52,0.875 1.5,0.875 ; -1.5,-1.5 -1.5,1.5 1.5,1.5 1.5,-1.5 -1.5,-1.5
  text ".Designator" at -4.511,-0.453 h2
3D body "LFCSP16(CP-16-48).x_t": height 0.8, standoff 0, extent -1.525,-1.525 1.525,1.525

## LFCSP-20(CP-20-6) [mm] "QFN, 20-Leads, Body 4x4mm, Pitch 0.50mm, Thermal Pad 2.10x2.10mm. Compliant to JEDEC standards MO-220-WGGD-1"
height 0.75
pads (21):
  rect 0.9x0.25 smd mask+0.05: 1(-1.85,1)
  oval 0.9x0.25 smd mask+0.05: 2(-1.85,0.5) 3(-1.85,0) 4(-1.85,-0.5) 5(-1.85,-1) 11(1.85,-1) 12(1.85,-0.5) 13(1.85,0) 14(1.85,0.5) 15(1.85,1)
  oval 0.25x0.9 smd mask+0.05: 6(-1,-1.85) 7(-0.5,-1.85) 8(0,-1.85) 9(0.5,-1.85) 10(1,-1.85) 16(1,1.85) 17(0.5,1.85) 18(0,1.85) 19(-0.5,1.85) 20(-1,1.85)
  rect 2.1x2.1 smd paste-5 mask+0.05: EP(0,0)
Top Overlay:
  circle w0.25: c-2.71,2.109 r0.1
  lines w0.2: -2.2,-1.495 -2.2,-2.195 -1.5,-2.195 ; -2.2,1.495 -2.2,2.195 -1.5,2.195 ; 1.5,-2.195 2.2,-2.195 2.2,-1.495 ; 1.5,2.195 2.2,2.195 2.2,1.495
Top Paste:
  rectangle: -0.95,0.15 -0.15,0.95
  rectangle: 0.15,0.15 0.95,0.95
  rectangle: -0.95,-0.95 -0.15,-0.15
  rectangle: 0.15,-0.95 0.95,-0.15
Top Courtyard:
  lines w0.025: -2.5,-1.65 -2.5,1.65 -2.2,1.65 -2.2,2.2 -1.65,2.2 -1.65,2.5 1.65,2.5 1.65,2.2 2.2,2.2 2.2,1.65 2.5,1.65 2.5,-1.65 2.2,-1.65 2.2,-2.2 1.65,-2.2 1.65,-2.5 -1.65,-2.5 -1.65,-2.2 -2.2,-2.2 -2.2,-1.65 -2.5,-1.65
Top Assembly:
  circle w0.05: c-1.6,1.6 r0.2
  lines w0.05: -2,-1.125 -2.02,-1.125 -2.02,-0.875 -2,-0.875 ; -2,-0.625 -2.02,-0.625 -2.02,-0.375 -2,-0.375 ; -2,-0.125 -2.02,-0.125 -2.02,0.125 -2,0.125 ; -2,0.375 -2.02,0.375 -2.02,0.625 -2,0.625 ; -2,0.875 -2.02,0.875 -2.02,1.125 -2,1.125 ; -1.125,-2 -1.125,-2.02 -0.875,-2.02 -0.875,-2 ; -1.125,2 -1.125,2.02 -0.875,2.02 -0.875,2 ; -0.625,-2 -0.625,-2.02 -0.375,-2.02 -0.375,-2 ; -0.625,2 -0.625,2.02 -0.375,2.02 -0.375,2 ; -0.125,-2 -0.125,-2.02 0.125,-2.02 0.125,-2 ; -0.125,2 -0.125,2.02 0.125,2.02 0.125,2 ; 0.375,-2 0.375,-2.02 0.625,-2.02 0.625,-2 ; 0.375,2 0.375,2.02 0.625,2.02 0.625,2 ; 0.875,-2 0.875,-2.02 1.125,-2.02 1.125,-2 ; 0.875,2 0.875,2.02 1.125,2.02 1.125,2 ; 2,-1.125 2.02,-1.125 2.02,-0.875 2,-0.875 ; 2,-0.625 2.02,-0.625 2.02,-0.375 2,-0.375 ; 2,-0.125 2.02,-0.125 2.02,0.125 2,0.125 ; 2,0.375 2.02,0.375 2.02,0.625 2,0.625 ; 2,0.875 2.02,0.875 2.02,1.125 2,1.125 ; -2,-2 2,-2 2,2 -2,2 -2,-2
  text ".Designator" at -4.511,-0.453 h2
3D body "CP-20-6(LFCSP20).x_t": height 0.78, standoff 0, extent -2.02,-2.02 2.02,2.02

## LFCSP-24(CP-24-16) [mm] "QFN, 24-Leads, Body 4x4mm, Pitch 0.50mm, Thermal Pad 2.70x2.70mm. Compliant to JEDEC standards MO-220-VGGD-6"
height 0.85
pads (25):
  rect 0.5x0.25 smd mask+0.05: 1(-1.805,1.25) 2(-1.805,0.75) 3(-1.805,0.25) 4(-1.805,-0.25) 5(-1.805,-0.75) 6(-1.805,-1.25) 13(1.805,-1.25) 14(1.805,-0.75) 15(1.805,-0.25) 16(1.805,0.25) 17(1.805,0.75) 18(1.805,1.25)
  rect 0.25x0.5 smd mask+0.05: 7(-1.25,-1.805) 8(-0.75,-1.805) 9(-0.25,-1.805) 10(0.25,-1.805) 11(0.75,-1.805) 12(1.25,-1.805) 19(1.25,1.805) 20(0.75,1.805) 21(0.25,1.805) 22(-0.25,1.805) 23(-0.75,1.805) 24(-1.25,1.805)
  rect 2.7x2.7 smd paste-5 mask+0.03: EP(0,0)
Top Overlay:
  circle w0.25: c-2.65,2.05 r0.1
  lines w0.2: -2.14,-1.686 -2.14,-2.141 -1.695,-2.141 ; -2.14,1.686 -2.14,2.141 -1.695,2.141 ; 1.695,-2.141 2.14,-2.141 2.14,-1.686 ; 1.695,2.141 2.14,2.141 2.14,1.686
Top Paste:
  rectangle: 0.6,0.6 1.2,1.2
  rectangle: -1.2,0.6 -0.6,1.2
  rectangle: -0.3,0.6 0.3,1.2
  rectangle: -1.2,-1.2 -0.6,-0.6
  rectangle: 0.6,-1.2 1.2,-0.6
  rectangle: -0.3,-1.2 0.3,-0.6
  rectangle: 0.6,-0.3 1.2,0.3
  rectangle: -1.2,-0.3 -0.6,0.3
  rectangle: -0.3,-0.3 0.3,0.3
  region: -2.05,-1.375 -2.05,-1.125 -2.104,-1.125 -2.104,-1.375
  region: 0.875,-2.05 0.625,-2.05 0.625,-2.104 0.875,-2.104
  region: -1.375,2.05 -1.125,2.05 -1.125,2.104 -1.375,2.104
  region: -0.875,2.05 -0.625,2.05 -0.625,2.104 -0.875,2.104
  region: -0.375,2.05 -0.125,2.05 -0.125,2.104 -0.375,2.104
  region: 0.125,2.05 0.375,2.05 0.375,2.104 0.125,2.104
  region: 0.625,2.05 0.875,2.05 0.875,2.104 0.625,2.104
  region: 1.125,2.05 1.375,2.05 1.375,2.104 1.125,2.104
  region: 2.05,1.375 2.05,1.125 2.104,1.125 2.104,1.375
  region: 2.05,0.875 2.05,0.625 2.104,0.625 2.104,0.875
  region: 2.05,0.375 2.05,0.125 2.104,0.125 2.104,0.375
  region: 2.05,-0.125 2.05,-0.375 2.104,-0.375 2.104,-0.125
  region: 2.05,-0.625 2.05,-0.875 2.104,-0.875 2.104,-0.625
  region: 2.05,-1.125 2.05,-1.375 2.104,-1.375 2.104,-1.125
  region: 1.375,-2.05 1.125,-2.05 1.125,-2.104 1.375,-2.104
  region: 0.375,-2.05 0.125,-2.05 0.125,-2.104 0.375,-2.104
  region: -0.125,-2.05 -0.375,-2.05 -0.375,-2.104 -0.125,-2.104
  region: -0.625,-2.05 -0.875,-2.05 -0.875,-2.104 -0.625,-2.104
  region: -1.125,-2.05 -1.375,-2.05 -1.375,-2.104 -1.125,-2.104
  region: -2.05,1.125 -2.05,1.375 -2.104,1.375 -2.104,1.125
  region: -2.05,0.625 -2.05,0.875 -2.104,0.875 -2.104,0.625
  region: -2.05,0.125 -2.05,0.375 -2.104,0.375 -2.104,0.125
  region: -2.05,-0.375 -2.05,-0.125 -2.104,-0.125 -2.104,-0.375
  region: -2.05,-0.875 -2.05,-0.625 -2.104,-0.625 -2.104,-0.875
Top Solder:
  region: 0.575,2.104 0.925,2.104 0.925,2.15 0.575,2.15
  region: 0.075,2.104 0.425,2.104 0.425,2.15 0.075,2.15
  region: -0.425,2.104 -0.075,2.104 -0.075,2.15 -0.425,2.15
  region: -0.925,2.104 -0.575,2.104 -0.575,2.15 -0.925,2.15
  region: -1.425,2.104 -1.075,2.104 -1.075,2.15 -1.425,2.15
  region: 2.104,-0.575 2.104,-0.925 2.15,-0.925 2.15,-0.575
  region: 2.104,-0.075 2.104,-0.425 2.15,-0.425 2.15,-0.075
  region: 2.104,0.425 2.104,0.075 2.15,0.075 2.15,0.425
  region: 2.104,0.925 2.104,0.575 2.15,0.575 2.15,0.925
  region: 2.104,1.425 2.104,1.075 2.15,1.075 2.15,1.425
  region: -1.075,-2.104 -1.425,-2.104 -1.425,-2.15 -1.075,-2.15
  region: -0.575,-2.104 -0.925,-2.104 -0.925,-2.15 -0.575,-2.15
  region: -0.075,-2.104 -0.425,-2.104 -0.425,-2.15 -0.075,-2.15
  region: 0.425,-2.104 0.075,-2.104 0.075,-2.15 0.425,-2.15
  region: 0.925,-2.104 0.575,-2.104 0.575,-2.15 0.925,-2.15
  region: 1.425,-2.104 1.075,-2.104 1.075,-2.15 1.425,-2.15
  region: -2.104,1.075 -2.104,1.425 -2.15,1.425 -2.15,1.075
  region: -2.104,0.575 -2.104,0.925 -2.15,0.925 -2.15,0.575
  region: -2.104,0.075 -2.104,0.425 -2.15,0.425 -2.15,0.075
  region: -2.104,-0.425 -2.104,-0.075 -2.15,-0.075 -2.15,-0.425
  region: -2.104,-0.925 -2.104,-0.575 -2.15,-0.575 -2.15,-0.925
  region: -2.104,-1.425 -2.104,-1.075 -2.15,-1.075 -2.15,-1.425
  region: 2.104,-1.425 2.104,-1.075 2.15,-1.075 2.15,-1.425
  region: 1.425,2.104 1.075,2.104 1.075,2.15 1.425,2.15
Top Courtyard:
  lines w0.025: -2.5,-1.65 -2.5,1.65 -2.2,1.65 -2.2,2.2 -1.65,2.2 -1.65,2.5 1.65,2.5 1.65,2.2 2.2,2.2 2.2,1.65 2.5,1.65 2.5,-1.65 2.2,-1.65 2.2,-2.2 1.65,-2.2 1.65,-2.5 -1.65,-2.5 -1.65,-2.2 -2.2,-2.2 -2.2,-1.65 -2.5,-1.65
Top Assembly:
  circle w0.05: c-1.5,1.5 r0.25
  lines w0.05: -2,-1.375 -2.02,-1.375 -2.02,-1.125 -2,-1.125 ; -2,-0.875 -2.02,-0.875 -2.02,-0.625 -2,-0.625 ; -2,-0.375 -2.02,-0.375 -2.02,-0.125 -2,-0.125 ; -2,0.125 -2.02,0.125 -2.02,0.375 -2,0.375 ; -2,0.625 -2.02,0.625 -2.02,0.875 -2,0.875 ; -2,1.125 -2.02,1.125 -2.02,1.375 -2,1.375 ; -1.375,-2 -1.375,-2.02 -1.125,-2.02 -1.125,-2 ; -1.375,2 -1.375,2.02 -1.125,2.02 -1.125,2 ; -0.875,-2 -0.875,-2.02 -0.625,-2.02 -0.625,-2 ; -0.875,2 -0.875,2.02 -0.625,2.02 -0.625,2 ; -0.375,-2 -0.375,-2.02 -0.125,-2.02 -0.125,-2 ; -0.375,2 -0.375,2.02 -0.125,2.02 -0.125,2 ; 0.125,-2 0.125,-2.02 0.375,-2.02 0.375,-2 ; 0.125,2 0.125,2.02 0.375,2.02 0.375,2 ; 0.625,-2 0.625,-2.02 0.875,-2.02 0.875,-2 ; 0.625,2 0.625,2.02 0.875,2.02 0.875,2 ; 1.125,-2 1.125,-2.02 1.375,-2.02 1.375,-2 ; 1.125,2 1.125,2.02 1.375,2.02 1.375,2 ; 2,-1.375 2.02,-1.375 2.02,-1.125 2,-1.125 ; 2,-0.875 2.02,-0.875 2.02,-0.625 2,-0.625 ; 2,-0.375 2.02,-0.375 2.02,-0.125 2,-0.125 ; 2,0.125 2.02,0.125 2.02,0.375 2,0.375 ; 2,0.625 2.02,0.625 2.02,0.875 2,0.875 ; 2,1.125 2.02,1.125 2.02,1.375 2,1.375 ; -2,-2 -2,2 2,2 2,-2 -2,-2
  text ".Designator" at -4.511,-0.453 h2
3D body "CP-24-16(LFCSP24).x_t": height 0.9, standoff 0, extent -2.02,-2.02 2.02,2.02

## LFCSP-24(CP-24-23) [mm] "QFN, 24-Leads, Body 4x4mm, Pitch 0.50mm, Thermal Pad 2.70x2.70mm. Compliant to JEDEC standards MO-220-WGGD-6"
height 0.75
pads (25):
  rect 0.5x0.25 smd mask+0.05: 1(-1.805,1.25) 2(-1.805,0.75) 3(-1.805,0.25) 4(-1.805,-0.25) 5(-1.805,-0.75) 6(-1.805,-1.25) 13(1.805,-1.25) 14(1.805,-0.75) 15(1.805,-0.25) 16(1.805,0.25) 17(1.805,0.75) 18(1.805,1.25)
  rect 0.25x0.5 smd mask+0.05: 7(-1.25,-1.805) 8(-0.75,-1.805) 9(-0.25,-1.805) 10(0.25,-1.805) 11(0.75,-1.805) 12(1.25,-1.805) 19(1.25,1.805) 20(0.75,1.805) 21(0.25,1.805) 22(-0.25,1.805) 23(-0.75,1.805) 24(-1.25,1.805)
  rect 2.7x2.7 smd paste-5 mask+0.03: EP(0,0)
Top Overlay:
  circle w0.25: c-2.65,2.05 r0.1
  lines w0.2: -2.14,-1.686 -2.14,-2.141 -1.695,-2.141 ; -2.14,1.686 -2.14,2.141 -1.695,2.141 ; 1.695,-2.141 2.14,-2.141 2.14,-1.686 ; 1.695,2.141 2.14,2.141 2.14,1.686
Top Paste:
  rectangle: 0.6,0.6 1.2,1.2
  rectangle: -1.2,0.6 -0.6,1.2
  rectangle: -0.3,0.6 0.3,1.2
  rectangle: -1.2,-1.2 -0.6,-0.6
  rectangle: 0.6,-1.2 1.2,-0.6
  rectangle: -0.3,-1.2 0.3,-0.6
  rectangle: 0.6,-0.3 1.2,0.3
  rectangle: -1.2,-0.3 -0.6,0.3
  rectangle: -0.3,-0.3 0.3,0.3
  region: -2.02,-1.375 -2.02,-1.125 -2.105,-1.125 -2.105,-1.375
  region: -2.01,-0.875 -2.01,-0.625 -2.105,-0.625 -2.105,-0.875
  region: -2.02,-0.375 -2.02,-0.125 -2.105,-0.125 -2.105,-0.375
  region: -2.01,0.125 -2.01,0.375 -2.105,0.375 -2.105,0.125
  region: -2.01,0.625 -2.01,0.875 -2.105,0.875 -2.105,0.625
  region: -2.02,1.125 -2.02,1.375 -2.105,1.375 -2.105,1.125
  region: -1.375,2.02 -1.125,2.02 -1.125,2.105 -1.375,2.105
  region: -0.875,2.02 -0.625,2.02 -0.625,2.105 -0.875,2.105
  region: -0.375,2.02 -0.125,2.02 -0.125,2.105 -0.375,2.105
  region: 0.125,2.02 0.375,2.02 0.375,2.105 0.125,2.105
  region: 0.625,2.02 0.875,2.02 0.875,2.105 0.625,2.105
  region: 1.125,2.02 1.375,2.02 1.375,2.105 1.125,2.105
  region: 2.02,1.375 2.02,1.125 2.105,1.125 2.105,1.375
  region: 2.01,0.875 2.01,0.625 2.105,0.625 2.105,0.875
  region: 2.02,0.375 2.02,0.125 2.105,0.125 2.105,0.375
  region: 2.01,-0.125 2.01,-0.375 2.105,-0.375 2.105,-0.125
  region: 2.055,-0.625 2.055,-0.875 2.105,-0.875 2.105,-0.625
  region: 2.02,-1.125 2.02,-1.375 2.105,-1.375 2.105,-1.125
  region: 1.375,-2.01 1.125,-2.01 1.125,-2.105 1.375,-2.105
  region: 0.875,-2.01 0.625,-2.01 0.625,-2.105 0.875,-2.105
  region: 0.375,-2.01 0.125,-2.01 0.125,-2.105 0.375,-2.105
  region: -0.125,-2.02 -0.375,-2.02 -0.375,-2.105 -0.125,-2.105
  region: -0.625,-2.02 -0.875,-2.02 -0.875,-2.105 -0.625,-2.105
  region: -1.125,-2.02 -1.375,-2.02 -1.375,-2.105 -1.125,-2.105
Top Solder:
  region: 2.104,1.425 2.104,1.075 2.15,1.075 2.15,1.425
  region: -1.425,2.104 -1.075,2.104 -1.075,2.15 -1.425,2.15
  region: -2.104,-1.425 -2.104,-1.075 -2.15,-1.075 -2.15,-1.425
  region: 1.425,-2.104 1.075,-2.104 1.075,-2.15 1.425,-2.15
  region: 0.925,-2.104 0.575,-2.104 0.575,-2.15 0.925,-2.15
  region: 0.425,-2.104 0.075,-2.104 0.075,-2.15 0.425,-2.15
  region: -0.075,-2.104 -0.425,-2.104 -0.425,-2.15 -0.075,-2.15
  region: -1.075,-2.104 -1.425,-2.104 -1.425,-2.15 -1.075,-2.15
  region: -0.575,-2.104 -0.925,-2.104 -0.925,-2.15 -0.575,-2.15
  region: 2.104,0.925 2.104,0.575 2.15,0.575 2.15,0.925
  region: 2.104,0.425 2.104,0.075 2.15,0.075 2.15,0.425
  region: 2.104,-0.075 2.104,-0.425 2.15,-0.425 2.15,-0.075
  region: 2.104,-1.075 2.104,-1.425 2.149,-1.425 2.15,-1.075
  region: 2.104,-0.575 2.104,-0.925 2.149,-0.925 2.15,-0.575
  region: -0.925,2.104 -0.575,2.104 -0.575,2.15 -0.925,2.15
  region: -0.425,2.104 -0.075,2.104 -0.075,2.15 -0.425,2.15
  region: 0.075,2.104 0.425,2.104 0.425,2.15 0.075,2.15
  region: 1.075,2.104 1.425,2.104 1.425,2.15 1.075,2.15
  region: 0.575,2.104 0.925,2.104 0.925,2.15 0.575,2.15
  region: -2.104,-0.925 -2.104,-0.575 -2.15,-0.575 -2.15,-0.925
  region: -2.104,-0.425 -2.104,-0.075 -2.15,-0.075 -2.15,-0.425
  region: -2.104,0.075 -2.104,0.425 -2.15,0.425 -2.15,0.075
  region: -2.104,1.075 -2.104,1.425 -2.15,1.425 -2.15,1.075
  region: -2.104,0.575 -2.104,0.925 -2.15,0.925 -2.15,0.575
Top Courtyard:
  lines w0.025: -2.5,-1.65 -2.2,-1.65 -2.2,-2.2 -1.65,-2.2 -1.65,-2.5 1.65,-2.5 1.65,-2.2 2.2,-2.2 2.2,-1.65 2.5,-1.65 2.5,1.65 2.2,1.65 2.2,2.2 1.65,2.2 1.65,2.5 -1.65,2.5 -1.65,2.2 -2.2,2.2 -2.2,1.65 -2.5,1.65 -2.5,-1.65
Top Assembly:
  circle w0.05: c-1.5,1.5 r0.25
  lines w0.05: -2,-1.375 -2.02,-1.375 -2.02,-1.125 -2,-1.125 ; -2,-0.875 -2.02,-0.875 -2.02,-0.625 -2,-0.625 ; -2,-0.375 -2.02,-0.375 -2.02,-0.125 -2,-0.125 ; -2,0.125 -2.02,0.125 -2.02,0.375 -2,0.375 ; -2,0.625 -2.02,0.625 -2.02,0.875 -2,0.875 ; -2,1.125 -2.02,1.125 -2.02,1.375 -2,1.375 ; -1.375,-2 -1.375,-2.02 -1.125,-2.02 -1.125,-2 ; -1.375,2 -1.375,2.02 -1.125,2.02 -1.125,2 ; -0.875,-2 -0.875,-2.02 -0.625,-2.02 -0.625,-2 ; -0.875,2 -0.875,2.02 -0.625,2.02 -0.625,2 ; -0.375,-2 -0.375,-2.02 -0.125,-2.02 -0.125,-2 ; -0.375,2 -0.375,2.02 -0.125,2.02 -0.125,2 ; 0.125,-2 0.125,-2.02 0.375,-2.02 0.375,-2 ; 0.125,2 0.125,2.02 0.375,2.02 0.375,2 ; 0.625,-2 0.625,-2.02 0.875,-2.02 0.875,-2 ; 0.625,2 0.625,2.02 0.875,2.02 0.875,2 ; 1.125,-2 1.125,-2.02 1.375,-2.02 1.375,-2 ; 1.125,2 1.125,2.02 1.375,2.02 1.375,2 ; 2,-1.375 2.02,-1.375 2.02,-1.125 2,-1.125 ; 2,-0.875 2.02,-0.875 2.02,-0.625 2,-0.625 ; 2,-0.375 2.02,-0.375 2.02,-0.125 2,-0.125 ; 2,0.125 2.02,0.125 2.02,0.375 2,0.375 ; 2,0.625 2.02,0.625 2.02,0.875 2,0.875 ; 2,1.125 2.02,1.125 2.02,1.375 2,1.375 ; -2,-2 2,-2 2,2 -2,2 -2,-2
  text ".Designator" at -4.511,-0.453 h2
3D body "CP-24-23(LFCSP24).x_t": height 0.8, standoff 0, extent -2.02,-2.02 2.02,2.02

## LFCSP-32(CP-32-7) [mm] "QFN, 32-Leads, Body 5x5mm, Pitch 0.50mm, Thermal Pad 3.10x3.10mm"
height 0.75
pads (33):
  rect 0.8x0.25 smd mask+0.07: 1(-2.445,1.75) 2(-2.445,1.25) 3(-2.445,0.75) 4(-2.445,0.25) 5(-2.445,-0.25) 6(-2.445,-0.75) 7(-2.445,-1.25) 8(-2.445,-1.75) 17(2.45,-1.75) 18(2.45,-1.25) 19(2.45,-0.75) 20(2.45,-0.25) 21(2.45,0.25) 22(2.45,0.75) 23(2.45,1.25) 24(2.45,1.75)
  rect 0.25x0.8 smd mask+0.07: 9(-1.75,-2.45) 10(-1.25,-2.45) 11(-0.75,-2.45) 12(-0.25,-2.45) 13(0.25,-2.45) 14(0.75,-2.45) 15(1.25,-2.45) 16(1.75,-2.45) 25(1.75,2.45) 26(1.25,2.45) 27(0.75,2.45) 28(0.25,2.45) 29(-0.25,2.45) 30(-0.75,2.45) 31(-1.25,2.45) 32(-1.75,2.45)
  rect 3.1x3.1 smd paste-5 mask+0.08: EP(0,0)
Top Overlay:
  circle w0.25: c-3.3,2.55 r0.1
  lines w0.2: -2.7,-2.375 -2.7,-2.7 -2.375,-2.7 ; -2.7,2.4 -2.7,2.7 -2.375,2.7 ; 2.375,-2.7 2.7,-2.7 2.7,-2.375 ; 2.375,2.7 2.7,2.7 2.7,2.375
Top Paste:
  rectangle: 0.9,-1.5 1.5,-0.9
  rectangle: -1.5,-1.5 -0.9,-0.9
  rectangle: 0.1,-1.5 0.7,-0.9
  rectangle: -0.7,-1.5 -0.1,-0.9
  rectangle: 0.9,-0.7 1.5,-0.1
  rectangle: -1.5,-0.7 -0.9,-0.1
  rectangle: 0.9,0.9 1.5,1.5
  rectangle: -1.5,0.9 -0.9,1.5
  rectangle: 0.1,0.9 0.7,1.5
  rectangle: -0.7,0.9 -0.1,1.5
  rectangle: 0.9,0.1 1.5,0.7
  rectangle: -1.5,0.1 -0.9,0.7
  rectangle: 0.1,-0.7 0.7,-0.1
  rectangle: -0.7,-0.7 -0.1,-0.1
  rectangle: 0.1,0.1 0.7,0.7
  rectangle: -0.7,0.1 -0.1,0.7
Top Courtyard:
  lines w0.025: -3.15,-2.15 -2.7,-2.15 -2.7,-2.7 -2.15,-2.7 -2.15,-3.15 2.15,-3.15 2.15,-2.7 2.7,-2.7 2.7,-2.15 3.15,-2.15 3.15,2.15 2.7,2.15 2.7,2.7 2.15,2.7 2.15,3.15 -2.15,3.15 -2.15,2.7 -2.7,2.7 -2.7,2.15 -3.15,2.15 -3.15,-2.15
Top Assembly:
  circle w0.05: c-2.1,2.1 r0.25
  lines w0.05: -2.5,-1.875 -2.51,-1.875 -2.51,-1.625 -2.5,-1.625 ; -2.5,-1.375 -2.51,-1.375 -2.51,-1.125 -2.5,-1.125 ; -2.5,-0.875 -2.51,-0.875 -2.51,-0.625 -2.5,-0.625 ; -2.5,-0.375 -2.51,-0.375 -2.51,-0.125 -2.5,-0.125 ; -2.5,0.125 -2.51,0.125 -2.51,0.375 -2.5,0.375 ; -2.5,0.625 -2.51,0.625 -2.51,0.875 -2.5,0.875 ; -2.5,1.125 -2.51,1.125 -2.51,1.375 -2.5,1.375 ; -2.5,1.625 -2.51,1.625 -2.51,1.875 -2.5,1.875 ; -1.875,-2.5 -1.875,-2.51 -1.625,-2.51 -1.625,-2.5 ; -1.875,2.5 -1.875,2.51 -1.625,2.51 -1.625,2.5 ; -1.375,-2.5 -1.375,-2.51 -1.125,-2.51 -1.125,-2.5 ; -1.375,2.5 -1.375,2.51 -1.125,2.51 -1.125,2.5 ; -0.875,-2.5 -0.875,-2.51 -0.625,-2.51 -0.625,-2.5 ; -0.875,2.5 -0.875,2.51 -0.625,2.51 -0.625,2.5 ; -0.375,-2.5 -0.375,-2.51 -0.125,-2.51 -0.125,-2.5 ; -0.375,2.5 -0.375,2.51 -0.125,2.51 -0.125,2.5 ; 0.125,-2.5 0.125,-2.51 0.375,-2.51 0.375,-2.5 ; 0.125,2.5 0.125,2.51 0.375,2.51 0.375,2.5 ; 0.625,-2.5 0.625,-2.51 0.875,-2.51 0.875,-2.5 ; 0.625,2.5 0.625,2.51 0.875,2.51 0.875,2.5 ; 1.125,-2.5 1.125,-2.51 1.375,-2.51 1.375,-2.5 ; 1.125,2.5 1.125,2.51 1.375,2.51 1.375,2.5 ; 1.625,-2.5 1.625,-2.51 1.875,-2.51 1.875,-2.5 ; 1.625,2.5 1.625,2.51 1.875,2.51 1.875,2.5 ; 2.5,-1.875 2.51,-1.875 2.51,-1.625 2.5,-1.625 ; 2.5,-1.375 2.51,-1.375 2.51,-1.125 2.5,-1.125 ; 2.5,-0.875 2.51,-0.875 2.51,-0.625 2.5,-0.625 ; 2.5,-0.375 2.51,-0.375 2.51,-0.125 2.5,-0.125 ; 2.5,0.125 2.51,0.125 2.51,0.375 2.5,0.375 ; 2.5,0.625 2.51,0.625 2.51,0.875 2.5,0.875 ; 2.5,1.125 2.51,1.125 2.51,1.375 2.5,1.375 ; 2.5,1.625 2.51,1.625 2.51,1.875 2.5,1.875 ; -2.5,-2.5 -2.5,2.5 2.5,2.5 2.5,-2.5 -2.5,-2.5
  text ".Designator" at -4.511,-0.453 h2
3D body "CP-32-7.x_t": height 0.8, standoff 0, extent -2.525,-2.525 2.525,2.525

## LFCSP-48(HCP-48-1) [mm] "QFN, 48-Leads, Body 7x7mm, Pitch 0.50mm, Thermal Pad 5.60x5.60mm"
height 0.85
pads (49):
  rect 0.7x0.25 smd paste+0 mask+0.05: 1(-3.45,2.75)
  oval 0.7x0.25 smd paste+0 mask+0.05: 2(-3.45,2.25) 3(-3.45,1.75) 4(-3.45,1.25) 5(-3.45,0.75) 6(-3.45,0.25) 7(-3.45,-0.25) 8(-3.45,-0.75) 9(-3.45,-1.25) 10(-3.45,-1.75) 11(-3.45,-2.25) 12(-3.45,-2.75) 25(3.45,-2.75) 26(3.45,-2.25) 27(3.45,-1.75) 28(3.45,-1.25) 29(3.45,-0.75) 30(3.45,-0.25) 31(3.45,0.25) 32(3.45,0.75) 33(3.45,1.25) 34(3.45,1.75) 35(3.45,2.25) 36(3.45,2.75)
  oval 0.25x0.7 smd paste+0 mask+0.05: 13(-2.75,-3.45) 14(-2.25,-3.45) 15(-1.75,-3.45) 16(-1.25,-3.45) 17(-0.75,-3.45) 18(-0.25,-3.45) 19(0.25,-3.45) 20(0.75,-3.45) 21(1.25,-3.45) 22(1.75,-3.45) 23(2.25,-3.45) 24(2.75,-3.45) 37(2.75,3.45) 38(2.25,3.45) 39(1.75,3.45) 40(1.25,3.45) 41(0.75,3.45) 42(0.25,3.45) 43(-0.25,3.45) 44(-0.75,3.45) 45(-1.25,3.45) 46(-1.75,3.45) 47(-2.25,3.45) 48(-2.75,3.45)
  rrect10% 5.6x5.6 smd paste-50 mask+0.05: EP(0,0)
Top Overlay:
  circle w0.25: c-4.4,2.75 r0.125
  lines w0.2: -3.65,-3.275 -3.65,-3.65 -3.275,-3.65 ; -3.65,3.275 -3.65,3.65 -3.275,3.65 ; 3.275,-3.65 3.65,-3.65 3.65,-3.275 ; 3.275,3.65 3.65,3.65 3.65,3.275
Top Paste:
  region: -2.45,2.45 -2.45,1.45 -1.45,1.45 -1.45,2.45
  region: -2.45,-1.45 -2.45,-2.45 -1.45,-2.45 -1.45,-1.45
  region: -1.15,-1.45 -1.15,-2.45 -0.15,-2.45 -0.15,-1.45
  region: 0.15,-1.45 0.15,-2.45 1.15,-2.45 1.15,-1.45
  region: 1.45,-1.45 1.45,-2.45 2.45,-2.45 2.45,-1.45
  region: -1.15,2.45 -1.15,1.45 -0.15,1.45 -0.15,2.45
  region: 0.15,2.45 0.15,1.45 1.15,1.45 1.15,2.45
  region: 1.45,2.45 1.45,1.45 2.45,1.45 2.45,2.45
  region: -2.45,1.15 -2.45,0.15 -1.45,0.15 -1.45,1.15
  region: -1.15,1.15 -1.15,0.15 -0.15,0.15 -0.15,1.15
  region: 0.15,1.15 0.15,0.15 1.15,0.15 1.15,1.15
  region: 1.45,1.15 1.45,0.15 2.45,0.15 2.45,1.15
  region: -2.45,-0.15 -2.45,-1.15 -1.45,-1.15 -1.45,-0.15
  region: -1.15,-0.15 -1.15,-1.15 -0.15,-1.15 -0.15,-0.15
  region: 0.15,-0.15 0.15,-1.15 1.15,-1.15 1.15,-0.15
  region: 1.45,-0.15 1.45,-1.15 2.45,-1.15 2.45,-0.15
Top Courtyard:
  lines w0.025: -4.05,-3.15 -4.05,3.15 -3.7,3.15 -3.7,3.7 -3.15,3.7 -3.15,4.05 3.15,4.05 3.15,3.7 3.7,3.7 3.7,3.15 4.05,3.15 4.05,-3.15 3.7,-3.15 3.7,-3.7 3.15,-3.7 3.15,-4.05 -3.15,-4.05 -3.15,-3.7 -3.7,-3.7 -3.7,-3.15 -4.05,-3.15
Top Assembly:
  circle w0.05: c-2.85,2.85 r0.35
  lines w0.05: -3.5,-2.875 -3.525,-2.875 -3.525,-2.625 -3.5,-2.625 ; -3.5,-2.375 -3.525,-2.375 -3.525,-2.125 -3.5,-2.125 ; -3.5,-1.875 -3.525,-1.875 -3.525,-1.625 -3.5,-1.625 ; -3.5,-1.375 -3.525,-1.375 -3.525,-1.125 -3.5,-1.125 ; -3.5,-0.875 -3.525,-0.875 -3.525,-0.625 -3.5,-0.625 ; -3.5,-0.375 -3.525,-0.375 -3.525,-0.125 -3.5,-0.125 ; -3.5,0.125 -3.525,0.125 -3.525,0.375 -3.5,0.375 ; -3.5,0.625 -3.525,0.625 -3.525,0.875 -3.5,0.875 ; -3.5,1.125 -3.525,1.125 -3.525,1.375 -3.5,1.375 ; -3.5,1.625 -3.525,1.625 -3.525,1.875 -3.5,1.875 ; -3.5,2.125 -3.525,2.125 -3.525,2.375 -3.5,2.375 ; -3.5,2.625 -3.525,2.625 -3.525,2.875 -3.5,2.875 ; -2.875,-3.5 -2.875,-3.525 -2.625,-3.525 -2.625,-3.5 ; -2.875,3.5 -2.875,3.525 -2.625,3.525 -2.625,3.5 ; -2.375,-3.5 -2.375,-3.525 -2.125,-3.525 -2.125,-3.5 ; -2.375,3.5 -2.375,3.525 -2.125,3.525 -2.125,3.5 ; -1.875,-3.5 -1.875,-3.525 -1.625,-3.525 -1.625,-3.5 ; -1.875,3.5 -1.875,3.525 -1.625,3.525 -1.625,3.5 ; -1.375,-3.5 -1.375,-3.525 -1.125,-3.525 -1.125,-3.5 ; -1.375,3.5 -1.375,3.525 -1.125,3.525 -1.125,3.5 ; -0.875,-3.5 -0.875,-3.525 -0.625,-3.525 -0.625,-3.5 ; -0.875,3.5 -0.875,3.525 -0.625,3.525 -0.625,3.5 ; -0.375,-3.5 -0.375,-3.525 -0.125,-3.525 -0.125,-3.5 ; -0.375,3.5 -0.375,3.525 -0.125,3.525 -0.125,3.5 ; 0.125,-3.5 0.125,-3.525 0.375,-3.525 0.375,-3.5 ; 0.125,3.5 0.125,3.525 0.375,3.525 0.375,3.5 ; 0.625,-3.5 0.625,-3.525 0.875,-3.525 0.875,-3.5 ; 0.625,3.5 0.625,3.525 0.875,3.525 0.875,3.5 ; 1.125,-3.5 1.125,-3.525 1.375,-3.525 1.375,-3.5 ; 1.125,3.5 1.125,3.525 1.375,3.525 1.375,3.5 ; 1.625,-3.5 1.625,-3.525 1.875,-3.525 1.875,-3.5 ; 1.625,3.5 1.625,3.525 1.875,3.525 1.875,3.5 ; 2.125,-3.5 2.125,-3.525 2.375,-3.525 2.375,-3.5 ; 2.125,3.5 2.125,3.525 2.375,3.525 2.375,3.5 ; 2.625,-3.5 2.625,-3.525 2.875,-3.525 2.875,-3.5 ; 2.625,3.5 2.625,3.525 2.875,3.525 2.875,3.5 ; 3.5,-2.875 3.525,-2.875 3.525,-2.625 3.5,-2.625 ; 3.5,-2.375 3.525,-2.375 3.525,-2.125 3.5,-2.125 ; 3.5,-1.875 3.525,-1.875 3.525,-1.625 3.5,-1.625 ; 3.5,-1.375 3.525,-1.375 3.525,-1.125 3.5,-1.125 ; 3.5,-0.875 3.525,-0.875 3.525,-0.625 3.5,-0.625 ; 3.5,-0.375 3.525,-0.375 3.525,-0.125 3.5,-0.125 ; 3.5,0.125 3.525,0.125 3.525,0.375 3.5,0.375 ; 3.5,0.625 3.525,0.625 3.525,0.875 3.5,0.875 ; 3.5,1.125 3.525,1.125 3.525,1.375 3.5,1.375 ; 3.5,1.625 3.525,1.625 3.525,1.875 3.5,1.875 ; 3.5,2.125 3.525,2.125 3.525,2.375 3.5,2.375 ; 3.5,2.625 3.525,2.625 3.525,2.875 3.5,2.875 ; -3.5,-3.5 3.5,-3.5 3.5,3.5 -3.5,3.5 -3.5,-3.5
  text ".Designator" at -4.511,-0.453 h2
3D body "HCP-48-1.x_t": height 0.9, standoff 0, extent -3.525,-3.525 3.525,3.525

## LFCSP-64(CP-64-7) [mm] "QFN, 64-Leads, Body 9x9mm, Pitch 0.50mm, Thermal Pad 5.21x5.21mm"
height 0.85
pads (65):
  rect 0.7x0.25 smd paste+0 mask+0.05: 1(-4.45,3.75)
  oval 0.7x0.25 smd paste+0 mask+0.05: 2(-4.45,3.25) 3(-4.45,2.75) 4(-4.45,2.25) 5(-4.45,1.75) 6(-4.45,1.25) 7(-4.45,0.75) 8(-4.45,0.25) 9(-4.45,-0.25) 10(-4.45,-0.75) 11(-4.45,-1.25) 12(-4.45,-1.75) 13(-4.45,-2.25) 14(-4.45,-2.75) 15(-4.45,-3.25) 16(-4.45,-3.75) 33(4.45,-3.75) 34(4.45,-3.25) 35(4.45,-2.75) 36(4.45,-2.25) 37(4.45,-1.75) 38(4.45,-1.25) 39(4.45,-0.75) 40(4.45,-0.25) 41(4.45,0.25) 42(4.45,0.75) 43(4.45,1.25) 44(4.45,1.75) 45(4.45,2.25) 46(4.45,2.75) 47(4.45,3.25) 48(4.45,3.75)
  oval 0.25x0.7 smd paste+0 mask+0.05: 17(-3.75,-4.45) 18(-3.25,-4.45) 19(-2.75,-4.45) 20(-2.25,-4.45) 21(-1.75,-4.45) 22(-1.25,-4.45) 23(-0.75,-4.45) 24(-0.25,-4.45) 25(0.25,-4.45) 26(0.75,-4.45) 27(1.25,-4.45) 28(1.75,-4.45) 29(2.25,-4.45) 30(2.75,-4.45) 31(3.25,-4.45) 32(3.75,-4.45) 49(3.75,4.45) 50(3.25,4.45) 51(2.75,4.45) 52(2.25,4.45) 53(1.75,4.45) 54(1.25,4.45) 55(0.75,4.45) 56(0.25,4.45) 57(-0.25,4.45) 58(-0.75,4.45) 59(-1.25,4.45) 60(-1.75,4.45) 61(-2.25,4.45) 62(-2.75,4.45) 63(-3.25,4.45) 64(-3.75,4.45)
  rrect5% 5.2x5.2 smd paste-50 mask+0.05: EP(0,0)
Top Overlay:
  circle w0.25: c-5.375,4.575 r0.125
  lines w0.2: -4.725,-4.275 -4.725,-4.725 -4.275,-4.725 ; -4.725,4.275 -4.725,4.725 -4.275,4.725 ; 4.275,-4.725 4.725,-4.725 4.725,-4.275 ; 4.275,4.725 4.725,4.725 4.725,4.275
Top Paste:
  region: -2.45,2.45 -2.45,1.45 -1.45,1.45 -1.45,2.45
  region: -2.45,-1.45 -2.45,-2.45 -1.45,-2.45 -1.45,-1.45
  region: -1.15,-1.45 -1.15,-2.45 -0.15,-2.45 -0.15,-1.45
  region: 0.15,-1.45 0.15,-2.45 1.15,-2.45 1.15,-1.45
  region: 1.45,-1.45 1.45,-2.45 2.45,-2.45 2.45,-1.45
  region: -1.15,2.45 -1.15,1.45 -0.15,1.45 -0.15,2.45
  region: 0.15,2.45 0.15,1.45 1.15,1.45 1.15,2.45
  region: 1.45,2.45 1.45,1.45 2.45,1.45 2.45,2.45
  region: -2.45,1.15 -2.45,0.15 -1.45,0.15 -1.45,1.15
  region: -1.15,1.15 -1.15,0.15 -0.15,0.15 -0.15,1.15
  region: 0.15,1.15 0.15,0.15 1.15,0.15 1.15,1.15
  region: 1.45,1.15 1.45,0.15 2.45,0.15 2.45,1.15
  region: -2.45,-0.15 -2.45,-1.15 -1.45,-1.15 -1.45,-0.15
  region: -1.15,-0.15 -1.15,-1.15 -0.15,-1.15 -0.15,-0.15
  region: 0.15,-0.15 0.15,-1.15 1.15,-1.15 1.15,-0.15
  region: 1.45,-0.15 1.45,-1.15 2.45,-1.15 2.45,-0.15
Top Courtyard:
  lines w0.025: -5.15,-4.15 -4.75,-4.15 -4.75,-4.75 -4.15,-4.75 -4.15,-5.15 4.15,-5.15 4.15,-4.75 4.75,-4.75 4.75,-4.15 5.15,-4.15 5.15,4.15 4.75,4.15 4.75,4.75 4.15,4.75 4.15,5.15 -4.15,5.15 -4.15,4.75 -4.75,4.75 -4.75,4.15 -5.15,4.15 -5.15,-4.15
Top Assembly:
  drawing of 345 lines, arcs and shapes, not listed
  text ".Designator" at -6.763,-0.679 h3
3D body "LFCSP_64_AD9912_CP_64_7.x_t": height 0.87, standoff 0.01, extent -4.51,-4.51 4.51,4.51

## LFCSP-64(CP-64-17) [mm] "QFN, 64-Leads, Body 9x9mm, Pitch 0.50mm, Thermal Pad 6.20x6.20mm"
height 0.9
pads (65):
  rect 0.7x0.25 smd paste+0 mask+0.05: 1(-4.45,3.75)
  oval 0.7x0.25 smd paste+0 mask+0.05: 2(-4.45,3.25) 3(-4.45,2.75) 4(-4.45,2.25) 5(-4.45,1.75) 6(-4.45,1.25) 7(-4.45,0.75) 8(-4.45,0.25) 9(-4.45,-0.25) 10(-4.45,-0.75) 11(-4.45,-1.25) 12(-4.45,-1.75) 13(-4.45,-2.25) 14(-4.45,-2.75) 15(-4.45,-3.25) 16(-4.45,-3.75) 33(4.45,-3.75) 34(4.45,-3.25) 35(4.45,-2.75) 36(4.45,-2.25) 37(4.45,-1.75) 38(4.45,-1.25) 39(4.45,-0.75) 40(4.45,-0.25) 41(4.45,0.25) 42(4.45,0.75) 43(4.45,1.25) 44(4.45,1.75) 45(4.45,2.25) 46(4.45,2.75) 47(4.45,3.25) 48(4.45,3.75)
  oval 0.25x0.7 smd paste+0 mask+0.05: 17(-3.75,-4.45) 18(-3.25,-4.45) 19(-2.75,-4.45) 20(-2.25,-4.45) 21(-1.75,-4.45) 22(-1.25,-4.45) 23(-0.75,-4.45) 24(-0.25,-4.45) 25(0.25,-4.45) 26(0.75,-4.45) 27(1.25,-4.45) 28(1.75,-4.45) 29(2.25,-4.45) 30(2.75,-4.45) 31(3.25,-4.45) 32(3.75,-4.45) 49(3.75,4.45) 50(3.25,4.45) 51(2.75,4.45) 52(2.25,4.45) 53(1.75,4.45) 54(1.25,4.45) 55(0.75,4.45) 56(0.25,4.45) 57(-0.25,4.45) 58(-0.75,4.45) 59(-1.25,4.45) 60(-1.75,4.45) 61(-2.25,4.45) 62(-2.75,4.45) 63(-3.25,4.45) 64(-3.75,4.45)
  rrect5% 6.2x6.2 smd paste-50 mask+0.05: EP(0,0)
Top Overlay:
  circle w0.25: c-5.375,4.575 r0.125
  lines w0.2: -4.725,-4.275 -4.725,-4.725 -4.275,-4.725 ; -4.725,4.275 -4.725,4.725 -4.275,4.725 ; 4.275,-4.725 4.725,-4.725 4.725,-4.275 ; 4.275,4.725 4.725,4.725 4.725,4.275
Top Paste:
  region: 0.75,0.45 0.75,-0.45 1.65,-0.45 1.65,0.45
  region: -0.45,0.45 -0.45,-0.45 0.45,-0.45 0.45,0.45
  region: 1.95,0.45 1.95,-0.45 2.85,-0.45 2.85,0.45
  region: -1.65,0.45 -1.65,-0.45 -0.75,-0.45 -0.75,0.45
  region: -2.85,0.45 -2.85,-0.45 -1.95,-0.45 -1.95,0.45
  region: 0.75,1.65 0.75,0.75 1.65,0.75 1.65,1.65
  region: -0.45,1.65 -0.45,0.75 0.45,0.75 0.45,1.65
  region: 1.95,1.65 1.95,0.75 2.85,0.75 2.85,1.65
  region: -1.65,1.65 -1.65,0.75 -0.75,0.75 -0.75,1.65
  region: -2.85,1.65 -2.85,0.75 -1.95,0.75 -1.95,1.65
  region: 0.75,2.85 0.75,1.95 1.65,1.95 1.65,2.85
  region: -0.45,2.85 -0.45,1.95 0.45,1.95 0.45,2.85
  region: 1.95,2.85 1.95,1.95 2.85,1.95 2.85,2.85
  region: -1.65,2.85 -1.65,1.95 -0.75,1.95 -0.75,2.85
  region: -2.85,2.85 -2.85,1.95 -1.95,1.95 -1.95,2.85
  region: 0.75,-1.95 0.75,-2.85 1.65,-2.85 1.65,-1.95
  region: -0.45,-1.95 -0.45,-2.85 0.45,-2.85 0.45,-1.95
  region: 1.95,-1.95 1.95,-2.85 2.85,-2.85 2.85,-1.95
  region: -1.65,-1.95 -1.65,-2.85 -0.75,-2.85 -0.75,-1.95
  region: -2.85,-1.95 -2.85,-2.85 -1.95,-2.85 -1.95,-1.95
  region: 0.75,-0.75 0.75,-1.65 1.65,-1.65 1.65,-0.75
  region: -0.45,-0.75 -0.45,-1.65 0.45,-1.65 0.45,-0.75
  region: 1.95,-0.75 1.95,-1.65 2.85,-1.65 2.85,-0.75
  region: -1.65,-0.75 -1.65,-1.65 -0.75,-1.65 -0.75,-0.75
  region: -2.85,-0.75 -2.85,-1.65 -1.95,-1.65 -1.95,-0.75
Top Courtyard:
  lines w0.025: -5.15,-4.15 -5.15,4.15 -4.75,4.15 -4.75,4.75 -4.15,4.75 -4.15,5.15 4.15,5.15 4.15,4.75 4.75,4.75 4.75,4.15 5.15,4.15 5.15,-4.15 4.75,-4.15 4.75,-4.75 4.15,-4.75 4.15,-5.15 -4.15,-5.15 -4.15,-4.75 -4.75,-4.75 -4.75,-4.15 -5.15,-4.15
Top Assembly:
  drawing of 197 lines, arcs and shapes, not listed
  text ".Designator" at -6.763,-0.679 h3
3D body "LFCSP64(CP-64-17).x_t": height 0.77, standoff 0, extent -4.52,-4.52 4.52,4.52